# Altium footprint library Arduino.PcbLib: 5 footprints
Each footprint in its own frame and in the unit in brackets; x right, y up, seen from the top. Pads: shape width x height; smd on the part's side, far side on the other; paste and mask are expansions set on the pad; w line width, h text height; cw(c..) or ccw(c..) is an arc to the next point about the centre after c.
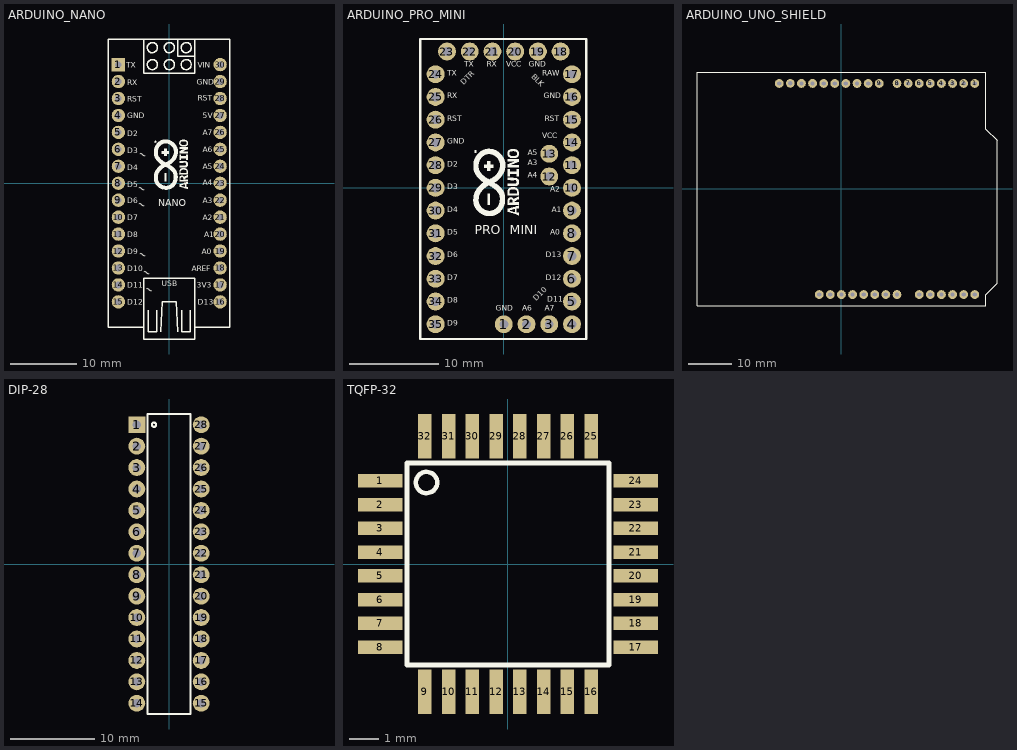
[diagram p0: the footprints below, top view; thin cyan lines are the x and y axes]

## ARDUINO_NANO [mm] "Based on ATmega328P, clock 16MHz, flash 32KB, 14 Digital Pins, 8 Analog Pins, 5V, Vin 7-12V."
pads (30):
  rect 2x2 hole 1: 1(-7.62,17.78)
  round 2 hole 1: 2(-7.62,15.24) 3(-7.62,12.7) 4(-7.62,10.16) 5(-7.62,7.62) 6(-7.62,5.08) 7(-7.62,2.54) 8(-7.62,0) 9(-7.62,-2.54) 10(-7.62,-5.08) 11(-7.62,-7.62) 12(-7.62,-10.16) 13(-7.62,-12.7) 14(-7.62,-15.24) 15(-7.62,-17.78) 16(7.62,-17.78) 17(7.62,-15.24) 18(7.62,-12.7) 19(7.62,-10.16) 20(7.62,-7.62) 21(7.62,-5.08) 22(7.62,-2.54) 23(7.62,0) 24(7.62,2.54) 25(7.62,5.08) 26(7.62,7.62) 27(7.62,10.16) 28(7.62,12.7) 29(7.62,15.24) 30(7.62,17.78)
Top Overlay:
  drawing of 41 lines, arcs and shapes, not listed
  text "NANO" at -1.651,-3.429 h1.02
  text "USB" at -1.092,-15.443 h0.81
  text "D13" at 4.242,-18.237 h0.81
  text "3V3" at 4.115,-15.697 h0.81
  text "AREF" at 3.353,-13.157 h0.81
  text "A0" at 4.877,-10.617 h0.81
  text "A1" at 5.258,-8.077 h0.81
  text "A2" at 5.004,-5.537 h0.81
  text "A3" at 5.004,-2.997 h0.81
  text "A4" at 5.004,-0.33 h0.81
  text "A5" at 5.004,2.083 h0.81
  text "A6" at 5.004,4.623 h0.81
  text "A7" at 5.004,7.163 h0.81
  text "5V" at 5.004,9.703 h0.81
  text "RST" at 4.242,12.37 h0.81
  text "D12" at -6.299,-18.237 h0.81
  text "D11" at -6.299,-15.697 h0.81
  text "D10" at -6.299,-13.157 h0.81
  text "D9" at -6.299,-10.617 h0.81
  text "D8" at -6.299,-8.077 h0.81
  text "D7" at -6.299,-5.537 h0.81
  text "D6" at -6.299,-2.997 h0.81
  text "D5" at -6.299,-0.584 h0.81
  text "D4" at -6.299,1.956 h0.81
  text "D3" at -6.299,4.496 h0.81
  text "D2" at -6.299,7.036 h0.81
  text "VIN" at 4.242,17.323 h0.81
  text "GND" at 4.115,14.783 h0.81
  text "GND" at -6.299,9.703 h0.81
  text "RST" at -6.299,12.243 h0.81
  text "RX" at -6.299,14.656 h0.81
  text "TX" at -6.426,17.323 h0.81
  text "~" at -4.75,4.084 h1.02
  text "~" at -4.877,-0.996 h1.02
  text "~" at -4.877,-3.409 h1.02
  text "~" at -3.734,-16.109 h1.02
  text "~" at -4.115,-13.569 h1.02
  text "~" at -4.75,-10.902 h1.02
3D body "NANO.STEP": height 12.64, standoff -5.96, extent -8.992,-23.364 9.008,21.636

## ARDUINO_PRO_MINI [mm] "Based on ATmega328P, clock 8/16MHz, flash 32KB, 14 Digital Pins, 8 Analog Pins, 3.3/5V."
pads (35):
  round 2 hole 1: 1(0,-15.24) 2(2.54,-15.24) 3(5.08,-15.24) 4(7.62,-15.24) 5(7.62,-12.7) 6(7.62,-10.16) 7(7.62,-7.62) 8(7.62,-5.08) 9(7.62,-2.54) 10(7.62,0) 11(7.62,2.54) 12(5.08,1.27) 13(5.08,3.81) 14(7.62,5.08) 15(7.62,7.62) 16(7.62,10.16) 17(7.62,12.7) 18(6.35,15.24) 19(3.81,15.24) 20(1.27,15.24) 21(-1.27,15.24) 22(-3.81,15.24) 23(-6.35,15.24) 24(-7.62,12.7) 25(-7.62,10.16) 26(-7.62,7.62) 27(-7.62,5.08) 28(-7.62,2.54) 29(-7.62,0) 30(-7.62,-2.54) 31(-7.62,-5.08) 32(-7.62,-7.62) 33(-7.62,-10.16) 34(-7.62,-12.7) 35(-7.62,-15.24)
Top Overlay:
  drawing of 15 lines, arcs and shapes, not listed
  text "PRO" at -3.272,-5.185 h1.02
  text "MINI" at 0.665,-5.185 h1.02
  text "D8" at -6.296,-13.081 h1.02
  text "D7" at -6.296,-10.541 h1.02
  text "D9" at -6.296,-15.621 h1.02
  text "D6" at -6.296,-8.001 h1.02
  text "D5" at -6.296,-5.461 h1.02
  text "D4" at -6.296,-2.921 h1.02
  text "D3" at -6.296,-0.381 h1.02
  text "D2" at -6.296,2.159 h1.02
  text "GND" at -6.296,4.699 h1.02
  text "RST" at -6.296,7.239 h1.02
  text "RX" at -6.296,9.779 h1.02
  text "TX" at -6.296,12.319 h1.02
  text "A3" at 2.671,2.282 h1.02
  text "A2" at 5.211,-0.639 h1.02
  text "GND" at -0.885,-13.974 h1.02
  text "A6" at 2.036,-13.974 h1.02
  text "A7" at 4.576,-13.974 h1.02
  text "D10" at 3.814,-12.831 h1.02
  text "D11" at 4.83,-12.958 h1.02
  text "D12" at 4.703,-10.545 h1.02
  text "D13" at 4.703,-8.005 h1.02
  text "A0" at 5.211,-5.465 h1.02
  text "A1" at 5.338,-2.925 h1.02
  text "A4" at 2.671,0.885 h1.02
  text "A5" at 2.671,3.425 h1.02
  text "VCC" at 4.322,5.33 h1.02
  text "RST" at 4.576,7.235 h1.02
  text "GND" at 4.449,9.775 h1.02
  text "RAW" at 4.322,12.315 h1.02
  text "BLK" at 2.925,12.188 h1.02
  text "GND" at 2.798,13.331 h1.02
  text "VCC" at 0.258,13.331 h1.02
  text "RX" at -1.901,13.331 h1.02
  text "TX" at -4.441,13.331 h1.02
  text "DTR" at -4.314,11.299 h1.02
3D body "PRO_MINI.step": height 6.64, standoff -5.73, extent -9.313,-16.75 9.186,16.75

## ARDUINO_UNO_SHIELD [mm]
pads (32):
  round 2 hole 1: 1(30.48,24.129) 2(27.94,24.129) 3(25.4,24.129) 4(22.86,24.129) 5(20.32,24.129) 6(17.78,24.129) 7(15.24,24.129) 8(12.7,24.129) 9(8.636,24.129) 10(6.096,24.129) 11(3.556,24.129) 12(1.016,24.129) 13(-1.524,24.129) 14(-4.064,24.129) 15(-6.604,24.129) 16(-9.144,24.129) 17(-11.684,24.145) 18(-14.224,24.129) 19(-5.08,-24.13) 20(-2.54,-24.13) 21(0,-24.13) 22(2.54,-24.13) 23(5.08,-24.13) 24(7.62,-24.13) 25(10.16,-24.13) 26(12.7,-24.13) 27(17.78,-24.13) 28(20.32,-24.13) 29(22.86,-24.13) 30(25.4,-24.13) 31(27.94,-24.13) 32(30.48,-24.13)
Top Overlay:
  lines w0.254: -33.02,-26.67 33.02,-26.67 33.02,-24.13 35.56,-21.59 35.56,11.176 33.02,13.716 33.02,26.67 -33.02,26.67 -33.02,-26.67
3D body "MALE_HEADER_8.STEP": height 2.74, standoff -8.36, extent 11.469,22.982 31.789,25.382
3D body "MALE_HEADER_10.STEP": height 2.74, standoff -8.36, extent -15.455,22.925 9.945,25.325
3D body "MALE_HEADER_8.STEP": height 2.74, standoff -8.36, extent -6.311,-25.278 14.009,-22.878
3D body "MALE_HEADER_6.STEP": height 2.74, standoff -8.36, extent 16.549,-25.265 31.789,-22.865

## DIP-28 [mm] "DIP-28"
pads (28):
  rect 2x2 hole 1: 1(-3.81,16.51)
  round 2 hole 1: 2(-3.81,13.97) 3(-3.81,11.43) 4(-3.81,8.89) 5(-3.81,6.35) 6(-3.81,3.81) 7(-3.81,1.27) 8(-3.81,-1.27) 9(-3.81,-3.81) 10(-3.81,-6.35) 11(-3.81,-8.89) 12(-3.81,-11.43) 13(-3.81,-13.97) 14(-3.81,-16.51) 15(3.81,-16.51) 16(3.81,-13.97) 17(3.81,-11.43) 18(3.81,-8.89) 19(3.81,-6.35) 20(3.81,-3.81) 21(3.81,-1.27) 22(3.81,1.27) 23(3.81,3.81) 24(3.81,6.35) 25(3.81,8.89) 26(3.81,11.43) 27(3.81,13.97) 28(3.81,16.51)
Top Overlay:
  circle w0.254: c-1.778,16.51 r0.254
  lines w0.229: -2.54,-17.78 -2.54,17.78 2.54,17.78 2.54,-17.78 -2.54,-17.78
3D body "ATMEGA328-PU.STEP": height 7.59, standoff -3.09, extent -5.067,-17.793 5.093,17.767

## TQFP-32 [mm] "TQFP-32(7x7)"
pads (32):
  rect 1.5x0.45 smd: 1(-4.3,2.8) 2(-4.3,2) 3(-4.3,1.2) 4(-4.3,0.4) 5(-4.3,-0.4) 6(-4.3,-1.2) 7(-4.3,-2) 8(-4.3,-2.8) 17(4.3,-2.8) 18(4.3,-2) 19(4.3,-1.2) 20(4.3,-0.4) 21(4.3,0.4) 22(4.3,1.2) 23(4.3,2) 24(4.3,2.8)
  rect 0.45x1.5 smd: 9(-2.8,-4.3) 10(-2,-4.3) 11(-1.2,-4.3) 12(-0.4,-4.3) 13(0.4,-4.3) 14(1.2,-4.3) 15(2,-4.3) 16(2.8,-4.3) 25(2.8,4.3) 26(2,4.3) 27(1.2,4.3) 28(0.4,4.3) 29(-0.4,4.3) 30(-1.2,4.3) 31(-2,4.3) 32(-2.8,4.3)
Top Overlay:
  circle w0.152: c-2.743,2.743 r0.359
  lines w0.152: -3.4,-3.4 3.4,-3.4 3.4,3.4 -3.4,3.4 -3.4,-3.4
3D body "step_temp.STEP": height 1.21, standoff 0.01, extent -4.5,-4.5 4.5,4.5